# Altium footprint library iMX6 Rex Development Baseboard V1I1_PCB.PcbLib: 77 footprints (part 5 of 5)
Each footprint in its own frame and in the unit in brackets; x right, y up, seen from the top. Pads: shape width x height; smd on the part's side, far side on the other; paste and mask are expansions set on the pad; w line width, h text height; cw(c..) or ccw(c..) is an arc to the next point about the centre after c.
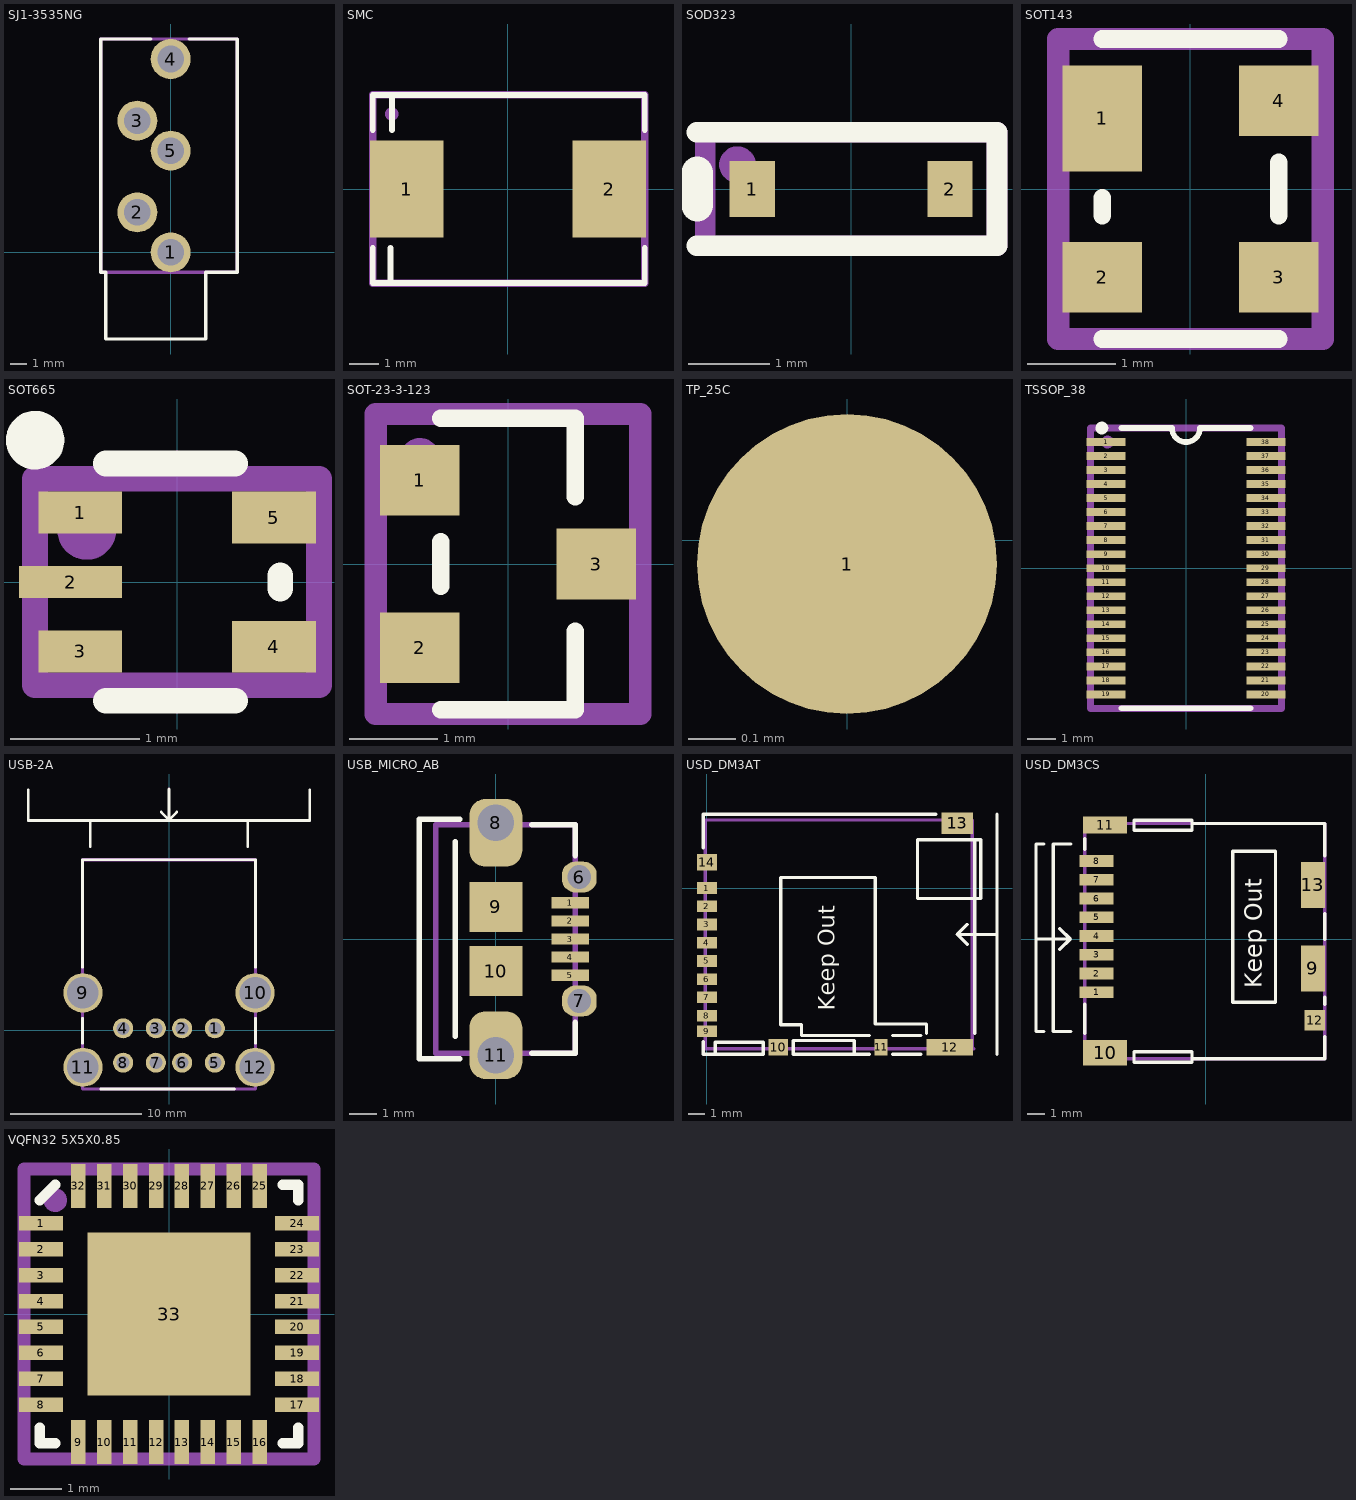
[diagram p4: the footprints below, top view; thin cyan lines are the x and y axes]

## SJ1-3535NG [mm]
pads (5):
  round 2.4 hole 1.6: 1(0,0) 2(-2,2.4) 3(-2,7.9) 4(0,11.6) 5(0,6.1)
Top Overlay:
  lines w0.2: -1.2,12.8 -4.2,12.8 -4.2,-1.2 -3.9,-1.2 -3.9,-5.2 2.1,-5.2 2.1,-1.2 4,-1.2 4,12.8 1.1,12.8
Top Solder:
  region: -1.65,8.65 0.65,6.35 -0.35,5.35 -2.65,7.65
Mechanical 1:
  lines w0.2: -4.2,12.8 -4.2,12.8
Mechanical 16:
  lines w0.2: -4.2,-1.2 -4.2,12.8 4,12.8 4,-1.2 -4.2,-1.2
Mechanical 29:
  text ".Designator" at -2,5.5 h1.2
3D body "SJ1-3535NG-PI.step": height 12.3, standoff -3.3, extent -4.2,-5.25 4,12.8

## SMC [mm]
pads (2):
  rect 2.5x3.3 smd: 1(-3.45,0) 2(3.45,0)
Top Overlay:
  lines w0.2: -4.6,-2 -4.6,-3.2 4.65,-3.2 4.65,-2 ; -4.6,2 -4.6,3.2 4.65,3.2 4.65,2 ; -4,-3.2 -4,-2 ; -3.95,2 -3.95,3.2
Mechanical 16:
  circle w0.254: c-3.95,2.55 r0.1
  lines w0.254: -4.6,-3.2 4.65,-3.2 4.65,3.2 -4.6,3.2 -4.6,-3.2
Mechanical 29:
  text ".Designator" at 2.1,0.8 h1.52
3D body "DO-214AB SMC.step": height 2.3, standoff 0, extent -3.975,-2.95 3.975,2.95

## SOD323 [mil]
pads (2):
  rect 22x27 smd mask+3: 1(-48,0) 2(48,0)
Top Overlay:
  lines w10: -74.8,-27.56 70.87,-27.56 70.87,27.56 -74.8,27.56
  lines w15.75: -74.8,-7.87 -74.8,7.87
Mechanical 16:
  circle w10: c-55.12,11.81 r3.94
  lines w10: -70.87,-27.56 -70.87,27.56 70.87,27.56 70.87,-27.56 -70.87,-27.56
Mechanical 29:
  text ".Designator" at -7.87,-7.87 h15.75
3D body "SOD323.step": height 38.78, standoff -0.2, extent -49.21,-24.6 49.21,24.61

## SOT143 [mm]
pads (4):
  rect 0.9x1.2 smd: 1(-1,0.8)
  rect 0.9x0.8 smd: 2(-1,-1) 3(1,-1) 4(1,1)
Top Overlay:
  lines w0.2: -1,-1.7 1,-1.7 ; -1,-0.3 -1,-0.1 ; -1,1.7 1,1.7 ; 1,-0.3 1,0.3
Mechanical 16:
  circle w0.254: c-1,1.1 r0.1
  lines w0.254: -1.5,-1.7 1.5,-1.7 1.5,1.7 -1.5,1.7 -1.5,-1.7
Mechanical 29:
  text ".Designator" at 0.35,-0.5 h0.6
3D body: height 1, standoff 0, extent -1,-1.7 1,1.7

## SOT665 [mm]
pads (5):
  rect 0.65x0.325 smd mask+0.05: 1(-0.75,0.538) 3(-0.75,-0.538)
  rect 0.8x0.25 smd mask+0.05: 2(-0.825,0)
  rect 0.65x0.4 smd mask+0.05: 4(0.75,-0.5) 5(0.75,0.5)
Top Overlay:
  circle w0.254: c-1.1,1.1 r0.1
  lines w0.2: -0.55,-0.92 0.45,-0.92 ; -0.55,0.92 0.45,0.92 ; 0.8,-0.05 0.8,0.05
Mechanical 16:
  circle w0.254: c-0.7,0.4 r0.1
  lines w0.2: -1.1,-0.8 -1.1,0.8 1.1,0.8 1.1,-0.8 -1.1,-0.8
Mechanical 29:
  text ".Designator" at 0,0.3 h0.4
3D body "SOT50P160X60-5.step": height 0.6, standoff 0, extent -0.8,-0.795 0.8,0.795

## SOT-23-3-123 [mm]
pads (3):
  rect 0.9x0.8 smd: 1(-1,0.95) 2(-1,-0.95) 3(1,0)
Top Overlay:
  lines w0.2: -0.762,-1.651 0.762,-1.651 0.762,-0.762 ; -0.762,-0.254 -0.762,0.254 ; -0.762,1.651 0.762,1.651 0.762,0.762
Mechanical 16:
  circle w0.254: c-1,1.2 r0.1
  lines w0.254: -1.5,-1.7 1.5,-1.7 1.5,1.7 -1.5,1.7 -1.5,-1.7
Mechanical 29:
  text ".Designator" at 0.3,-0.7 h0.6
3D body: height 1.1, standoff 0, extent -0.762,-1.651 0.762,1.651
3D body: height 0.5, standoff 0, extent -1.27,0.572 -0.762,1.333
3D body: height 0.5, standoff 0, extent -1.27,-1.333 -0.762,-0.572
3D body: height 0.5, standoff 0, extent 0.762,-0.381 1.27,0.381

## TP_25C [mm]
pads (1):
  round 0.635 smd paste-0.635 mask+0.051: 1(0,-0.05)

## TSSOP_38 [mm]
pads (38):
  rect 1.4x0.28 smd mask+0.025: 1(-2.85,4.5) 2(-2.85,4) 3(-2.85,3.5) 4(-2.85,3) 5(-2.85,2.5) 6(-2.85,2) 7(-2.85,1.5) 8(-2.85,1) 9(-2.85,0.5) 10(-2.85,0) 11(-2.85,-0.5) 12(-2.85,-1) 13(-2.85,-1.5) 14(-2.85,-2) 15(-2.85,-2.5) 16(-2.85,-3) 17(-2.85,-3.5) 18(-2.85,-4) 19(-2.85,-4.5) 20(2.85,-4.5) 21(2.85,-4) 22(2.85,-3.5) 23(2.85,-3) 24(2.85,-2.5) 25(2.85,-2) 26(2.85,-1.5) 27(2.85,-1) 28(2.85,-0.5) 29(2.85,0) 30(2.85,0.5) 31(2.85,1) 32(2.85,1.5) 33(2.85,2) 34(2.85,2.5) 35(2.85,3) 36(2.85,3.5) 37(2.85,4) 38(2.85,4.5)
Top Overlay:
  circle w0.254: c-3,5 r0.1
  lines w0.2: -2.3,-5 2.3,-5 ; -2.3,5 -0.5,5 ccw(c-0.001,5) 0.499,5 ; 0.5,5 2.3,5
Mechanical 16:
  circle w0.254: c-2.8,4.5 r0.1
  lines w0.254: -3.4,-5 -3.4,5 3.4,5 3.4,-5 -3.4,-5
Mechanical 29:
  text ".Designator" at -0.5,0.8 h1.52
3D body: height 1.2, standoff 0, extent -2.3,-5 2.3,5

## USB-2A [mm]
pads (12):
  round 1.524 hole 1: 1(3.5,0.13) 2(1,0.13) 3(-1,0.13) 4(-3.5,0.13) 5(3.5,-2.49) 6(1,-2.49) 7(-1,-2.49) 8(-3.5,-2.49)
  round 3 hole 2.4: 9(-6.57,2.84) 10(6.57,2.84) 11(-6.57,-2.84) 12(6.57,-2.84)
Top Overlay:
  lines w0.2: -10.75,18.35 -10.75,16 10.75,16 10.75,18.35 ; -6.6,-1 -6.6,0.9 ; -6.6,4.8 -6.6,13 6.6,13 6.6,4.8 ; -6,14 -6,16 ; -5.2,-4.5 5,-4.5 ; -0.6,16.65 0,16.05 ; 0,18.4 0,16.05 ; 0.6,16.65 0,16.05 ; 6,14 6,16 ; 6.6,-1 6.6,0.9
Mechanical 16:
  lines w0.254: -6.6,-4.5 -6.6,13 6.6,13 6.6,-4.5 -6.6,-4.5
Mechanical 29:
  text ".Designator" at -2,5.8 h1.52
3D body "c-5787617-1-c-3d.stp": height 15.78, standoff -4.37, extent -8.1,-4.1 8.139,13.08

## USB_MICRO_AB [mm]
pads (11):
  rect 1.35x0.4 smd mask+0.025: 1(2.675,1.3) 2(2.675,0.65) 3(2.675,0) 4(2.675,-0.65) 5(2.675,-1.3)
  rrect84% 1.25x1.1 hole 0.85 mask+0.04: 6(3,2.225) 7(3,-2.225)
  rrect60% 1.9x2.425 hole 1.3 copper offset 0,-0.363: 8(0,4.175)
  rect 1.9x1.8 smd paste-10: 9(0,1.15) 10(0,-1.15)
  rrect60% 1.9x2.425 hole 1.3 copper offset 0,0.363: 11(0,-4.175)
Top Overlay:
  lines w0.2: -1.45,-3.5 -1.45,3.5 ; -1.3,-4.3 -2.75,-4.3 -2.75,4.3 -1.3,4.3 ; 1.3,-4.1 2.85,-4.1 2.85,-3 ; 1.3,4.1 2.85,4.1 2.85,3
Mechanical 16:
  lines w0.2: -2.15,-4.1 2.85,-4.1 2.85,4.1 -2.15,4.1 -2.15,-4.1
Mechanical 29:
  text ".Designator" at 1.2,-1.9 h1.52
3D body "475890001.stp": height 2.76, standoff -0.58, extent -2.75,-4.325 3.045,4.325

## USD_DM3AT [mm]
pads (14):
  rect 1.2x0.7 smd: 1(0,0) 2(0,-1.1) 3(0,-2.2) 4(0,-3.3) 5(0,-4.4) 6(0,-5.5) 7(0,-6.6)
  rect 1.2x0.7 smd mask+0.07: 8(0,-7.7) 9(0,-8.65)
  rect 1.2x1 smd: 10(4.3,-9.6) 14(0,1.55)
  rect 0.8x1 smd: 11(10.5,-9.6)
  rect 2.8x1 smd: 12(14.65,-9.6)
  rect 1.9x1.3 smd: 13(15.1,3.9)
Top Overlay:
  lines w0.2: -0.231,-9.271 -0.231,-10.033 3.4,-10.033 ; -0.231,2.413 -0.231,4.445 13.8,4.445 ; 0.5,-10.033 0.5,-9.3 3.4,-9.3 3.4,-10.004 ; 8.89,-10.033 8.89,-9.21 8.89,-9.2 5.2,-9.2 5.2,-10.033 9.8,-10.033 ; 9.8,-8.9 5.7,-8.9 5.7,-8.255 4.445,-8.255 4.445,0.635 10.16,0.635 10.16,-8.2 13.245,-8.2 13.245,-8.755 ; 11.2,-10.033 12.9,-10.033 ; 11.2,-8.9 12.9,-8.9 ; 15.7,-3.4 15.1,-2.8 ; 15.7,-2.2 15.1,-2.8 ; 16.152,-8.763 16.152,2.921 ; 17.45,-2.8 15.1,-2.8 ; 17.495,-10.033 17.495,4.445 ; 12.7,-0.635 12.7,2.921 16.51,2.921 16.51,-0.635 12.7,-0.635
  text "Keep Out" at 7.7,-7.4 h1
Mechanical 16:
  lines w0.2: -0.1,-9.7 -0.1,4.1 16,4.1 16,-9.6 16.1,-9.7 -0.1,-9.7
Mechanical 29:
  text ".Designator" at 8.5,-4.8 h1.52
3D body "DM3AT-SF-PEJM5.stp": height 1.68, standoff 0, extent -0.1,-9.7 16.05,4.15

## USD_DM3CS [mm]
pads (13):
  rect 2x0.7 smd: 1(-6.4,-3.125) 2(-6.4,-2.025) 3(-6.4,-0.925) 4(-6.4,0.175) 5(-6.4,1.275) 6(-6.4,2.375) 7(-6.4,3.475) 8(-6.4,4.575)
  rect 1.4x2.7 smd: 9(6.3,-1.725) 13(6.3,3.175)
  rect 2.6x1.5 smd: 10(-5.9,-6.675)
  rect 2.6x1 smd: 11(-5.9,6.675)
  rect 1.2x1.2 smd: 12(6.4,-4.775)
Top Overlay:
  lines w0.2: -9.95,0 -7.95,0 ; -9.5,-5.425 -9.95,-5.425 -9.95,5.575 -9.5,5.575 ; -8.55,-0.6 -7.95,0 ; -8.55,0.6 -7.95,0 ; -7.9,-5.425 -8.95,-5.425 -8.95,5.575 -7.9,5.575 ; -7.1,-5.525 -7.1,-3.825 ; -7.1,5.275 -7.1,5.875 ; -0.8,-7.025 7,-7.025 7,-5.725 ; -0.8,6.775 7,6.775 7,4.875 ; 7,-3.825 7,-3.425 ; 7,-0.025 7,1.475 ; -4.2,-7.225 -0.8,-7.225 -0.8,-6.625 -4.2,-6.625 -4.2,-7.225 ; -4.2,6.375 -4.2,6.975 -0.8,6.975 -0.8,6.375 -4.2,6.375 ; 1.6,-3.7 4.1,-3.7 4.1,5.15 1.6,5.15 1.6,-3.7
  text "Keep Out" at 3.3,-2.9 h1
Mechanical 16:
  lines w0.2: -7.1,-7.025 7,-7.025 7,6.775 -7.1,6.775 -7.1,-7.025
Mechanical 29:
  text ".Designator" at -0.2,-2 h1.52
3D body "DM3CS-SF.stp": height 1.98, standoff 0.05, extent -7.1,-7.025 7,6.775

## VQFN32 5X5X0.85 [mm]
pads (33):
  rect 0.85x0.28 smd mask+0.025: 1(-2.475,1.75) 2(-2.475,1.25) 3(-2.475,0.75) 4(-2.475,0.25) 5(-2.475,-0.25) 6(-2.475,-0.75) 7(-2.475,-1.25) 8(-2.475,-1.75) 17(2.475,-1.75) 18(2.475,-1.25) 19(2.475,-0.75) 20(2.475,-0.25) 21(2.475,0.25) 22(2.475,0.75) 23(2.475,1.25) 24(2.475,1.75)
  rect 0.28x0.85 smd mask+0.025: 9(-1.75,-2.475) 10(-1.25,-2.475) 11(-0.75,-2.475) 12(-0.25,-2.475) 13(0.25,-2.475) 14(0.75,-2.475) 15(1.25,-2.475) 16(1.75,-2.475) 25(1.75,2.475) 26(1.25,2.475) 27(0.75,2.475) 28(0.25,2.475) 29(-0.25,2.475) 30(-0.75,2.475) 31(-1.25,2.475) 32(-1.75,2.475)
  rect 3.15x3.15 smd paste-10 mask+0.025: 33(0,0)
Top Overlay:
  lines w0.2: -2.5,-2.2 -2.5,-2.5 -2.2,-2.5 ; -2.5,2.2 -2.2,2.5 ; 2.2,-2.5 2.5,-2.5 2.5,-2.2 ; 2.2,2.5 2.5,2.5 2.5,2.2
Top Paste:
  region: 1.5,-0.1 0.1,-0.1 0.1,-1.5 1.5,-1.5
  region: -0.1,-1.5 -0.1,-0.1 -1.5,-0.1 -1.5,-1.5
  region: 0.1,1.5 0.1,0.1 1.5,0.1 1.5,1.5
  rectangle: -1.5,0.1 -0.1,1.5
Mechanical 16:
  circle w0.254: c-2.2,2.2 r0.1
  lines w0.254: -2.8,-2.8 2.8,-2.8 2.8,2.8 -2.8,2.8 -2.8,-2.8
Mechanical 29:
  text ".Designator" at -0.6,1 h1.2
3D body: height 0.9, standoff 0, extent -2.5,-2.5 2.5,2.5